# Altium footprint library ACB_PcbLib.PcbLib: 152 footprints (part 3 of 10)
Each footprint in its own frame and in the unit in brackets; x right, y up, seen from the top. Pads: shape width x height; smd on the part's side, far side on the other; paste and mask are expansions set on the pad; w line width, h text height; cw(c..) or ccw(c..) is an arc to the next point about the centre after c.
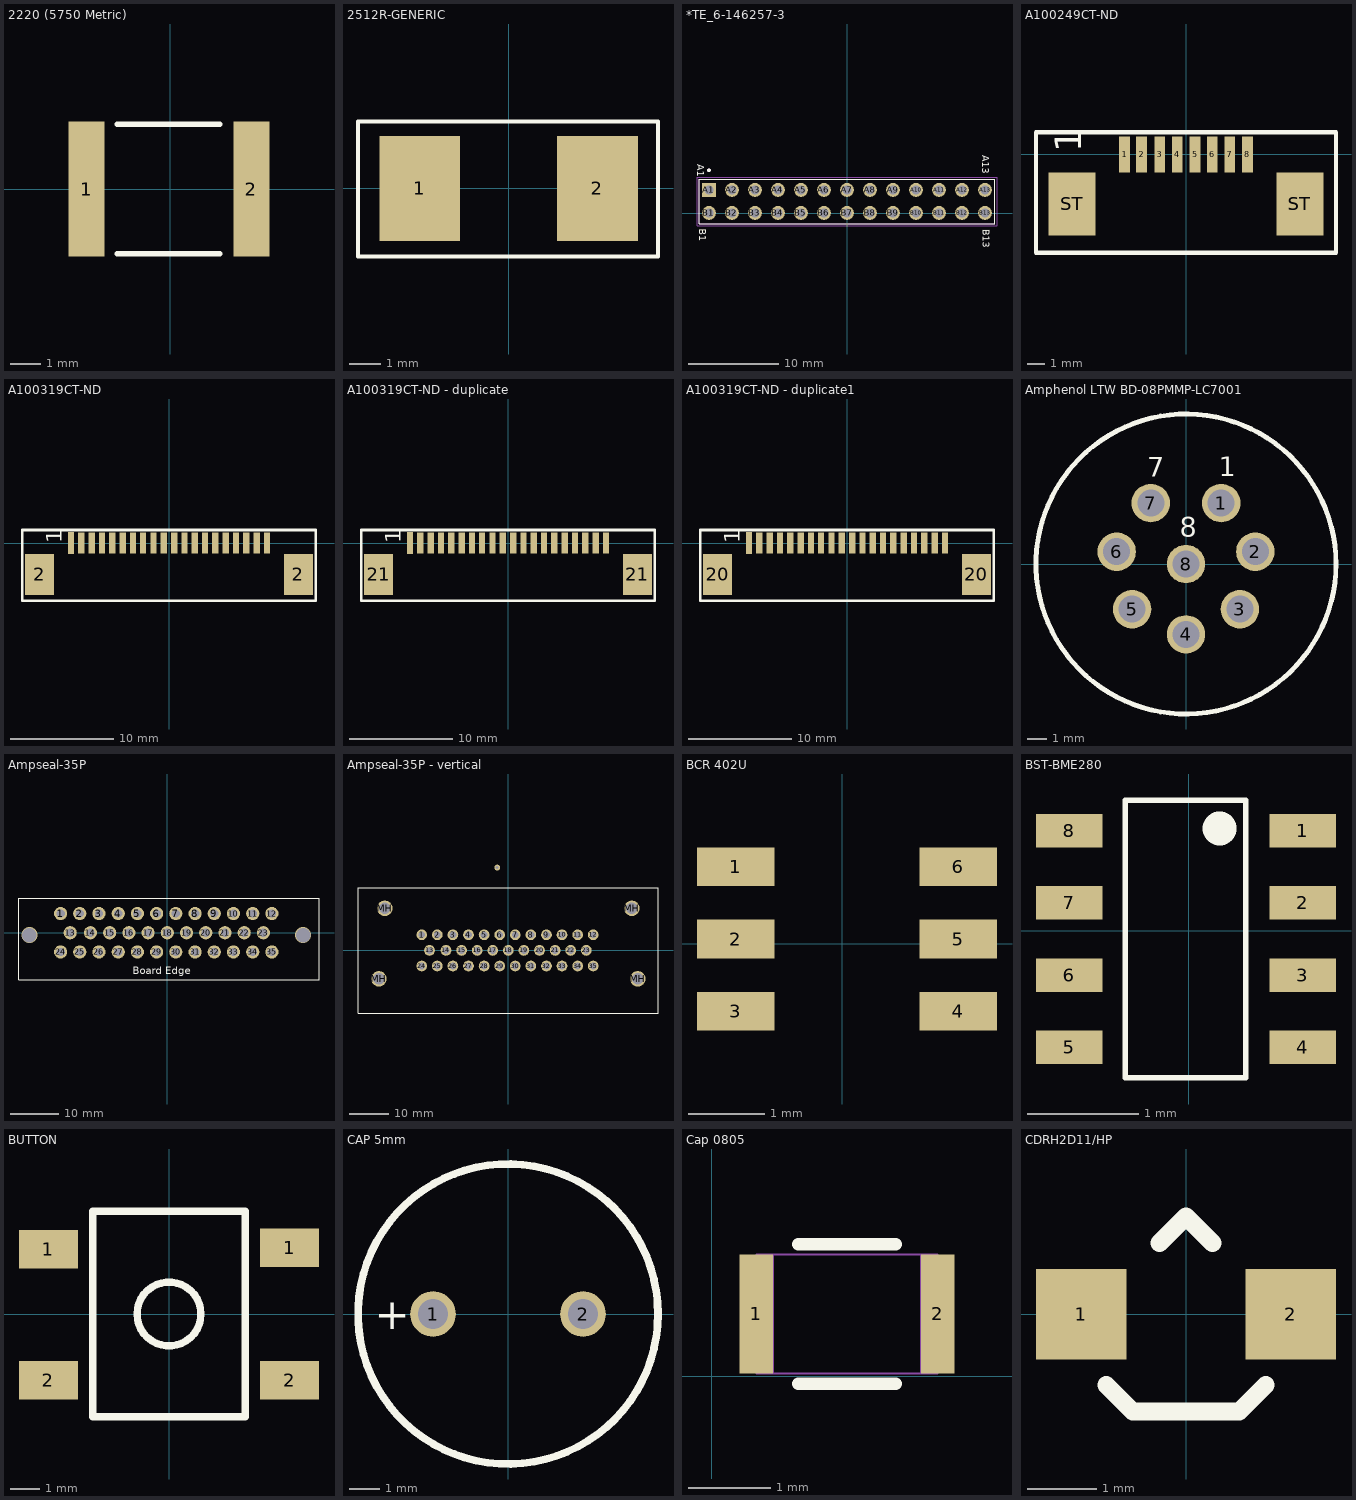
[diagram p2: the footprints below, top view; thin cyan lines are the x and y axes]

## 2220 (5750 Metric) [mm]
pads (2):
  rect 1.2x4.5 smd: 1(-2.794,0) 2(2.706,0)
Top Overlay:
  lines w0.178: -1.778,-2.159 1.651,-2.159 ; -1.778,2.159 1.651,2.159

## 2512R-GENERIC [mil]
pads (2):
  rect 100x130 smd: 1(-110,0) 2(110,0)
Top Overlay:
  lines w5: -186.32,-84 -186.32,0 -186.32,82.68 185.04,82.68 185.04,-84 -186.32,-84
3D body: height 19, standoff 0, extent -139,-60.5 -115,61
3D body: height 19, standoff 0, extent 112.5,-60.5 136,61
3D body: height 19, standoff 18, extent -115,-55.5 112.5,56.5
3D body: height 18, standoff 0, extent -137,-60.5 134.5,61

## *TE_6-146257-3 [mm]
pads (26):
  rect 1.53x1.53 hole 1.02: A1(-15.24,2.565)
  round 1.53 hole 1.02: A2(-12.7,2.565) A3(-10.16,2.565) A4(-7.62,2.565) A5(-5.08,2.565) A6(-2.54,2.565) A7(0,2.565) A8(2.54,2.565) A9(5.08,2.565) A10(7.62,2.565) A11(10.16,2.565) A12(12.7,2.565) A13(15.24,2.565) B1(-15.24,0.025) B2(-12.7,0.025) B3(-10.16,0.025) B4(-7.62,0.025) B5(-5.08,0.025) B6(-2.54,0.025) B7(0,0.025) B8(2.54,0.025) B9(5.08,0.025) B10(7.62,0.025) B11(10.16,0.025) B12(12.7,0.025) B13(15.24,0.025)
Top Overlay:
  circle w0.2: c-15.24,4.735 r0.1
  lines w0.127: -16.31,-1.145 -16.31,3.735 16.31,3.735 16.31,-1.145 -16.31,-1.145
  text "A1" at -16.56,5.4 h0.76
  text "B1" at -16.335,-1.7 h0.76
  text "A13" at 14.925,6.375 h0.76
  text "B13" at 15,-1.8 h0.76
Mechanical 4:
  circle w0.2: c-15.24,4.735 r0.1
  circle w0.2: c-15.24,4.735 r0.1
  lines w0.127: -16.31,-1.145 -16.31,3.735 ; -16.31,-1.145 16.31,-1.145 ; -16.31,-1.145 -16.31,3.735 ; -16.31,-1.145 16.31,-1.145 ; -16.31,3.735 16.31,3.735 ; -16.31,3.735 16.31,3.735 ; 16.31,-1.145 16.31,3.735 ; 16.31,-1.145 16.31,3.735
Mechanical 16:
  lines w0.05: -16.56,-1.395 -16.56,3.985 16.56,3.985 16.56,-1.395 -16.56,-1.395
3D body "Pin Header 1x13 TH Pitch 2.54mm.stp": height 9.5, standoff -3.2, extent -16.61,-4.84 16.41,-2.3
3D body "Pin Header 1x13 TH Pitch 2.54mm.stp": height 9.5, standoff -3.2, extent -16.52,1.27 16.5,3.81

## A100249CT-ND [mil]
pads (10):
  rect 24x80 smd: 1(-137.8,0) 2(-99.6,0) 3(-59.06,0) 4(-19.68,0) 5(20.4,0) 6(59.06,0) 7(98.43,0) 8(137.8,0)
  rect 105.51x141.73 smd: ST(-255.51,-110.87) ST(255.51,-110.87)
Top Overlay:
  lines w10: -336.38,-220 336.38,-220 336.38,50 -336.38,50 -336.38,-220
  text "1" at -235,5 h60
3D body: height 100.79, standoff 7.09, extent -340,-220 340,50

## A100319CT-ND [mil]
pads (22):
  rect 24x82.68 smd: 1(-374.02,0)
  rect 110.24x157.48 smd: 2(-494.09,-120.08) 2(494.09,-120.08)
  rect 24x80 smd: 2(-334.65,0) 3(-295.28,0) 4(-255.91,0) 5(-216.54,0) 6(-177.17,0) 7(-137.8,0) 8(-99.6,0) 9(-59.06,0) 10(-19.68,0) 11(20.4,0) 12(59.06,0) 13(98.43,0) 14(137.8,0) 15(177.17,0) 16(216.54,0) 17(255.91,0) 18(295.28,0) 19(334.65,0) 20(374.02,0)
Top Overlay:
  lines w10: -560,-220 -560,50 560,50 560,-220 -560,-220
  text "1" at -410,0 h60
3D body "A100319CT-ND.stp": height 100.2, standoff -0.59, extent -549.61,-225.55 549.61,31.93

## A100319CT-ND - duplicate [mil]
pads (22):
  rect 24x82.68 smd: 1(-374.02,0)
  rect 24x80 smd: 2(-334.65,0) 3(-295.28,0) 4(-255.91,0) 5(-216.54,0) 6(-177.17,0) 7(-137.8,0) 8(-99.6,0) 9(-59.06,0) 10(-19.68,0) 11(20.4,0) 12(59.06,0) 13(98.43,0) 14(137.8,0) 15(177.17,0) 16(216.54,0) 17(255.91,0) 18(295.28,0) 19(334.65,0) 20(374.02,0)
  rect 110.24x157.48 smd: 21(-494.09,-120.08) 21(494.09,-120.08)
Top Overlay:
  lines w10: -560,-220 -560,50 560,50 560,-220 -560,-220
  text "1" at -410,0 h60
3D body "A100319CT-ND.stp": height 100.2, standoff -0.59, extent -549.61,-225.55 549.61,31.93

## A100319CT-ND - duplicate1 [mil]
pads (22):
  rect 24x82.68 smd: 1(-374.02,0)
  rect 24x80 smd: 2(-334.65,0) 3(-295.28,0) 4(-255.91,0) 5(-216.54,0) 6(-177.17,0) 7(-137.8,0) 8(-99.6,0) 9(-59.06,0) 10(-19.68,0) 11(20.4,0) 12(59.06,0) 13(98.43,0) 14(137.8,0) 15(177.17,0) 16(216.54,0) 17(255.91,0) 18(295.28,0) 19(334.65,0) 20(374.02,0)
  rect 110.24x157.48 smd: 20(-494.09,-120.08) 20(494.09,-120.08)
Top Overlay:
  lines w10: -560,-220 -560,50 560,50 560,-220 -560,-220
  text "1" at -410,0 h60
3D body "A100319CT-ND.stp": height 100.2, standoff -0.59, extent -549.61,-225.55 549.61,31.93

## Amphenol LTW BD-08PMMP-LC7001 [mm]
pads (8):
  round 2 hole 1.4: 1(1.83,3.17) 2(3.605,0.64) 3(2.805,-2.35) 4(0,-3.66) 5(-2.805,-2.35) 6(-3.605,0.64) 7(-1.83,3.17) 8(0,0)
Top Overlay:
  circle w0.254: c0,0 r7.8
  text "8" at -0.325,1.425 h1.02
  text "7" at -2.025,4.525 h1.02
  text "1" at 1.7,4.575 h1.02
3D body: height 18, standoff 4, extent -7.25,-7.247 7.25,7.247
3D body: height 4, standoff 2.2, extent -10.15,-10.147 10.15,10.147
3D body: height 2.2, standoff 0, extent -7,-7 7,7

## Ampseal-35P [mm]
pads (35):
  round 2.75 hole 1.75: 1(-22.225,4) 2(-18.225,4) 3(-14.225,4) 4(-10.225,4) 5(-6.225,4) 6(-2.225,4) 7(1.775,4) 8(5.775,4) 9(9.775,4) 10(13.775,4) 11(17.775,4) 12(21.775,4) 13(-20.225,0) 14(-16,0) 15(-12,0) 16(-8,0) 17(-4,0) 18(0,0) 19(4,0) 20(8,0) 21(12,0) 22(16,0) 23(20,0) 24(-22.225,-4) 25(-18.225,-4) 26(-14.225,-4) 27(-10.225,-4) 28(-6.225,-4) 29(-2.225,-4) 30(1.775,-4) 31(5.775,-4) 32(9.775,-4) 33(13.775,-4) 34(17.775,-4) 35(21.775,-4)
via -28.725,-0.5 diameter 3.3 hole 3
via 28.275,-0.5 diameter 3.3 hole 3
Top Overlay:
  lines w0.254: -30.875,-9.8 -30.875,7.2 31.575,7.2 31.575,-9.8 -30.875,-9.8
  text "Board Edge" at -7.175,-8.6 h1.52
3D body "c-776163-1-r-3d.stp": height 27.85, standoff -4.25, extent -38.7,-31.675 38.2,6.125

## Ampseal-35P - vertical [mm]
pads (40):
  round 2.75 hole 1.75: 1(-22.225,4) 2(-18.225,4) 3(-14.225,4) 4(-10.225,4) 5(-6.225,4) 6(-2.225,4) 7(1.775,4) 8(5.775,4) 9(9.775,4) 10(13.775,4) 11(17.775,4) 12(21.775,4) 13(-20.225,0) 14(-16,0) 15(-12,0) 16(-8,0) 17(-4,0) 18(0,0) 19(4,0) 20(8,0) 21(12,0) 22(16,0) 23(20,0) 24(-22.225,-4) 25(-18.225,-4) 26(-14.225,-4) 27(-10.225,-4) 28(-6.225,-4) 29(-2.225,-4) 30(1.775,-4) 31(5.775,-4) 32(9.775,-4) 33(13.775,-4) 34(17.775,-4) 35(21.775,-4)
  round 1.524 hole 0.762: 6(-2.85,21.25)
  round 4 hole 3: MH(-33.2,-7.3) MH(-31.7,10.8) MH(31.7,10.8) MH(33.2,-7.3)
Top Overlay:
  lines w0.254: -38.575,-16.15 38.4,-16.15 38.4,16.075 -38.575,16.075 -38.575,-16.15
  text "." at -38.225,17.05 h1.52
3D body "c-1-776231-2-d-3d.stp": height 34, standoff -4.05, extent -38.625,-16.025 38.275,16.075

## BCR 402U [mil]
pads (6):
  rect 40x20 smd: 1(-55,39.8) 2(-55,2.4) 3(-55,-35) 4(60,-35) 5(60,2.4) 6(60,39.8)
Top Overlay:
  text "." at -60,65 h39.37

## BST-BME280 [mm] "Environmental sensor."
pads (8):
  rect 0.6x0.3 smd: 1(1.025,0.9) 2(1.025,0.25) 3(1.025,-0.4) 4(1.025,-1.05) 5(-1.075,-1.05) 6(-1.075,-0.4) 7(-1.075,0.25) 8(-1.075,0.9)
Top Overlay:
  circle w0.254: c0.277,0.92 r0.025
  lines w0.05: -0.57,-1.325 -0.57,1.175 0.514,1.175 0.514,-1.325 -0.57,-1.325

## BUTTON [mm]
pads (4):
  rect 2x1.3 smd: 1(-4.1,2.2) 1(4.1,2.25) 2(-4.1,-2.25) 2(4.1,-2.25)
Top Overlay:
  circle w0.254: c0,0 r1.085
  lines w0.254: -2.6,-3.5 -2.6,3.5 2.6,3.5 2.6,-3.5 -2.6,-3.5

## CAP 5mm [mm]
pads (2):
  round 1.524 hole 1: 1(-2.5,0) 2(2.5,0)
Top Overlay:
  circle w0.254: c0,0 r5
  text "+" at -4.445,-0.508 h1.02
3D body: height 18, standoff 0, extent -5,-4.92 5,5.08

## Cap 0805 [mil]
pads (2):
  rect 16x57 smd: 1(21.5,30) 2(108.5,30)
Top Overlay:
  lines w6: 41.61,-3.5 88.39,-3.5 ; 41.61,63.5 88.39,63.5
Mechanical 1:
  circle w1: c26.5,30 r3
  lines w1: 21.5,1.5 21.5,58.5 ; 21.5,1.5 29.5,1.5 29.5,58.5 21.5,58.5 ; 21.5,1.5 108.5,1.5 ; 21.5,1.5 21.5,58.5 ; 21.5,58.5 108.5,58.5 ; 108.5,1.5 100.5,1.5 100.5,58.5 108.5,58.5 ; 108.5,1.5 108.5,58.5 ; 108.5,1.5 108.5,58.5
3D body "CAP_2012.stp": height 49.02, standoff 0, extent 21.5,1.5 108.51,58.51

## CDRH2D11/HP [mm]
pads (2):
  rect 1.3x1.3 smd: 1(-1.5,0) 2(1.5,0)
Top Overlay:
  lines w0.254: -1.143,-1.016 -0.762,-1.397 0.762,-1.397 1.143,-1.016 ; -0.381,1.019 0,1.4 0.381,1.019